# Altium schematic symbol library FM24W256-GTR.SchLib: 1 symbol
Pins are listed as number, name and electrical type; pins without a type are passive.

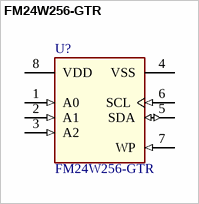
[diagram p0: symbol FM24W256-GTR]

## FM24W256-GTR
designator U?
64-Kbit ( 8K x 8) Serial I2C F-RAM; Manufacturer: Infineon Technologies; Manufacturer Order Number: FM24W256-GTR; PackageReference: PG-DSO-8-802
pins: 1 A0 (in) "Device Select Address 0", 2 A1 (in) "Device Select Address 1", 3 A2 (in) "Device Select Address 2", 4 VSS (power) "Ground for the Device", 5 SDA (io) "Serial Data/Address", 6 SCL (in) "Serial Clock", 7 WP (in) "Write Protect", 8 VDD (power) "Power Supply Input to the Device"